# Altium footprint library 5007620483.PcbLib: 1 footprints
Each footprint in its own frame and in the unit in brackets; x right, y up, seen from the top. Pads: shape width x height; smd on the part's side, far side on the other; paste and mask are expansions set on the pad; w line width, h text height; cw(c..) or ccw(c..) is an arc to the next point about the centre after c.
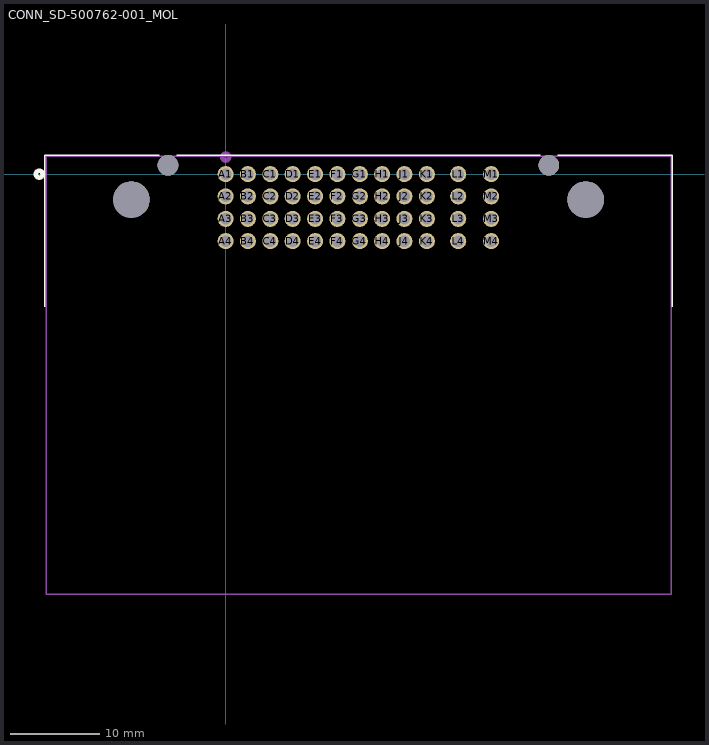
[diagram p0: the footprint, top view; thin cyan lines are the x and y axes]

## CONN_SD-500762-001_MOL [mil]
pads (52):
  round 71 hole 51: A1(0,0) A2(0,-98) A3(0,-197) A4(0,-295) B1(98,0) B2(98,-98) B3(98,-197) B4(98,-295) C1(197,0) C2(197,-98) C3(197,-197) C4(197,-295) D1(295,0) D2(295,-98) D3(295,-197) D4(295,-295) E1(394,0) E2(394,-98) E3(394,-197) E4(394,-295) F1(492,0) F2(492,-98) F3(492,-197) F4(492,-295) G1(591,0) G2(591,-98) G3(591,-197) G4(591,-295) H1(689,0) H2(689,-98) H3(689,-197) H4(689,-295) J1(787,0) J2(787,-98) J3(787,-197) J4(787,-295) K1(886,0) K2(886,-98) K3(886,-197) K4(886,-295) L1(1024,0) L2(1024,-98) L3(1024,-197) L4(1024,-295) M1(1169,0) M2(1169,-98) M3(1169,-197) M4(1169,-295)
  round 161 hole 161 unplated: ""(-415,-112) ""(1585,-112)
  round 91 hole 91 unplated: ""(-254,39) ""(1423,39)
Top Overlay:
  lines w6: -796,-584 -796,84 -292,84 ; -216,84 1385,84 ; 1462,84 1966,84 1966,-584
  lines w20: -836,0 cw(c-821,0) -806,0 cw(c-821,0) -836,0
Bottom Overlay:
  lines w20: -836,0 cw(c-821,0) -806,0 cw(c-821,0) -836,0
Assembly Top:
  lines w6: -791,-1850 -791,79 1961,79 1961,-1850 -791,-1850
  lines w20: -15,75 cw(c0,75) 15,75 cw(c0,75) -15,75